# Altium integrated library VIETTIEN.IntLib: 173 symbols (part 5 of 8)

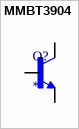
[diagram p92: symbol MMBT3904]

## MMBT3904
designator Q?
BJT, SOT-23, 40V, 200mA, NPN, 0.35W, 150Â°C; MF: Diotec Semiconductor; MP: MMBT3904; SnapEDA_Link: https://www.snapeda.com/parts/MMBT3904/Diotec/view-part/?ref=snap; Package: SOT-23 Diotec; Value: *; Check_prices: https://www.snapeda.com/parts/MMBT3904/Diotec/view-part/?ref=eda
footprint TRANS_MMBT3904
pins: 1 B, 2 E, 3 C


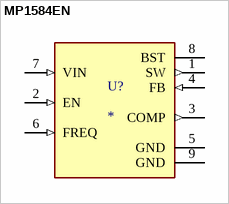
[diagram p93: symbol MP1584EN]

## MP1584EN
designator U?
Buck Switching Regulator IC Positive Adjustable 0.8V 1 Output 3A 8-SOIC (0.154, 3.90mm Width) Exposed Pad; MF: Monolithic Power; MP: MP1584EN; SnapEDA_Link: https://www.snapeda.com/parts/MP1584EN/Monolithic+Power+Systems/view-part/?ref=snap; Package: SOIC-8 Monolithic Power; Value: *; Check_prices: https://www.snapeda.com/parts/MP1584EN/Monolithic+Power+Systems/view-part/?ref=eda
footprint SOIC127P600X170-9N
pins: 1 SW (out), 2 EN (in), 3 COMP (out), 4 FB (in), 5 GND (power), 6 FREQ (in), 7 VIN (in), 8 BST, 9 GND (power)


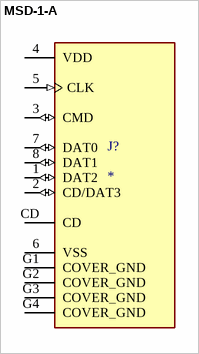
[diagram p94: symbol MSD-1-A]

## MSD-1-A
designator J?
Micro SD Card Connector, 9 Positions, Connector and Ejector, Push In, Auto Eject Out, Surface Mount, 1.8 mm Height Above Board, Gold Flash; MF: Same Sky; MP: MSD-1-A; SnapEDA_Link: https://www.snapeda.com/parts/MSD-1-A/Same+Sky/view-part/?ref=snap; Package: None; Value: *; Check_prices: https://www.snapeda.com/parts/MSD-1-A/Same+Sky/view-part/?ref=eda
footprint CUI_MSD-1-A
pins: 1 DAT2 (io), 2 CD/DAT3 (io), 3 CMD (io), 4 VDD (power), 5 CLK (in), 6 VSS (power), 7 DAT0 (io), 8 DAT1 (io), CD, G1 COVER_GND (power), G2 COVER_GND (power), G3 COVER_GND (power), G4 COVER_GND (power)


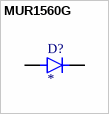
[diagram p95: symbol MUR1560G]

## MUR1560G
designator D?
Diode Standard 600 V 15A Through Hole TO-220-2; MF: ON Semiconductor; MP: MUR1560G; Check_prices: https://www.snapeda.com/parts/MUR1560G/Onsemi/view-part/?ref=eda; Value: *; Purchase-URL: https://pricing.snapeda.com/search/part/MUR1560G/?ref=eda; Price: None; Package: TO-220-2 ON Semiconductor; Availability: In Stock; SnapEDA_Link: https://www.snapeda.com/parts/MUR1560G/Onsemi/view-part/?ref=snap
footprint TO508P997X444X1905-2
pins: 1 K, 3 A


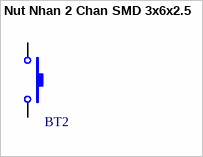
[diagram p96: symbol Nut Nhan 2 Chan SMD 3x6x2.5]

## Nut Nhan 2 Chan SMD 3x6x2.5
designator BT2  (value not drawn)
Ma_Hang: MH001036; Ten: Nút Nhấn 2 Chân 3x6x2.5MM SMD
footprint PCBComponent_1
pins: 1, 2


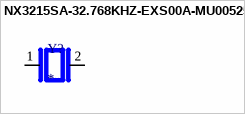
[diagram p97: symbol NX3215SA-32.768KHZ-EXS00A-MU00525]

## NX3215SA-32.768KHZ-EXS00A-MU00525
designator Y?
32.768 kHz - Crystal 6pF 50 kOhms 2-SMD, No Lead; MF: NDK America,; MP: NX3215SA-32.768KHZ-EXS00A-MU00525; SnapEDA_Link: https://www.snapeda.com/parts/NX3215SA-32.768KHZ-EXS00A-MU00525/NDK/view-part/?ref=snap; Package: SMD-2 NDK; Value: *; Check_prices: https://www.snapeda.com/parts/NX3215SA-32.768KHZ-EXS00A-MU00525/NDK/view-part/?ref=eda
footprint XTAL_NX3215SA-32.768KHZ-EXS00A-MU00525
pins: 1, 2


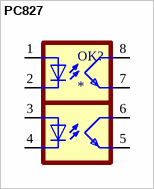
[diagram p98: symbol PC827]

## PC827
designator OK?
PowerPC G2_LE Microprocessor IC MPC82xx 1 Core, 32-Bit 450MHz 480-TBGA (37.5x37.5); MF: Sharp Microelectronics; MP: PC827; Price: None; SnapEDA_Link: https://www.snapeda.com/parts/PC827/Sharp%20Microelectronics/view-part/1087397/?ref=snap; Availability: Unavailable; Value: *; Package: DIP-8 Sharp; Check_prices: https://www.snapeda.com/parts/PC827/Sharp%20Microelectronics/view-part/1087397/?ref=eda
footprint DIL08
pins: 1 A, 2 C, 3 A, 4 C, 5 EMIT, 6 COL, 7 EMIT, 8 COL


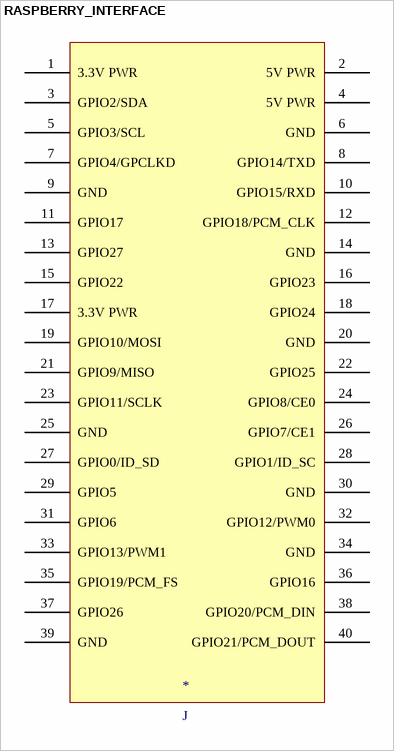
[diagram p99: symbol RASPBERRY_INTERFACE]

## RASPBERRY_INTERFACE
designator *, comment J
RASPBERRY_INTERFACE
footprint GPIO_INTERFACE
pins: 1 3.3V PWR, 2 5V PWR, 3 GPIO2/SDA, 4 5V PWR, 5 GPIO3/SCL, 6 GND, 7 GPIO4/GPCLKD, 8 GPIO14/TXD, 9 GND, 10 GPIO15/RXD, 11 GPIO17, 12 GPIO18/PCM_CLK, 13 GPIO27, 14 GND, 15 GPIO22, 16 GPIO23, 17 3.3V PWR, 18 GPIO24, 19 GPIO10/MOSI, 20 GND, 21 GPIO9/MISO, 22 GPIO25, 23 GPIO11/SCLK, 24 GPIO8/CE0, 25 GND, 26 GPIO7/CE1, 27 GPIO0/ID_SD, 28 GPIO1/ID_SC, 29 GPIO5, 30 GND, 31 GPIO6, 32 GPIO12/PWM0, 33 GPIO13/PWM1, 34 GND, 35 GPIO19/PCM_FS, 36 GPIO16, 37 GPIO26, 38 GPIO20/PCM_DIN, 39 GND, 40 GPIO21/PCM_DOUT


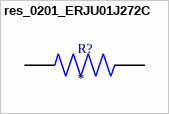
[diagram p100: symbol res_0201_ERJU01J272C]

## res_0201_ERJU01J272C
designator R?
MP: ERJU01J272C; Availability: Unavailable; Price: None; Package: None; Value: *
footprint RES_ERJU01J272C
pins: 1, 2


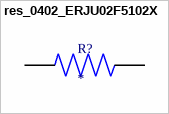
[diagram p101: symbol res_0402_ERJU02F5102X]

## res_0402_ERJU02F5102X
designator R?
MP: ERJU02F5102X; Availability: Unavailable; Price: None; Package: None; Value: *
footprint RES_ERJU02F5102X
pins: 1, 2


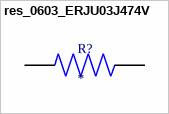
[diagram p102: symbol res_0603_ERJU03J474V]

## res_0603_ERJU03J474V
designator R?
0603 Anti-Sulfurated; MF: Panasonic; MP: ERJU03J474V; SnapEDA_Link: https://www.snapeda.com/parts/ERJU03J474V/Panasonic/view-part/?ref=snap; Package: 1608-2 Panasonic; Value: *; Check_prices: https://www.snapeda.com/parts/ERJU03J474V/Panasonic/view-part/?ref=eda
footprint RES_ERJU03J474V
pins: 1, 2


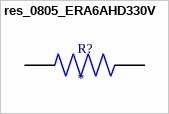
[diagram p103: symbol res_0805_ERA6AHD330V]

## res_0805_ERA6AHD330V
designator R?
RES 0805; MP: ERA6AHD330V; Package: None; Price: None; Value: *; Availability: Unavailable
footprint RES_ERA6AHD330V
pins: 1, 2


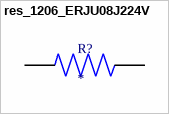
[diagram p104: symbol res_1206_ERJU08J224V]

## res_1206_ERJU08J224V
designator R?
RES 1206; MP: ERJU08J224V; Value: *; Price: None; Package: None; Availability: Unavailable
footprint RES_ERJU08J224V
pins: 1, 2


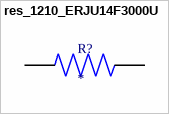
[diagram p105: symbol res_1210_ERJU14F3000U]

## res_1210_ERJU14F3000U
designator R?
RES_1210; MP: ERJU14F3000U; Availability: Unavailable; Package: None; Value: *; Price: None
footprint RES_ERJU14F3000U
pins: 1, 2


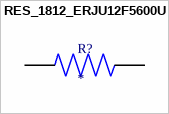
[diagram p106: symbol RES_1812_ERJU12F5600U]

## RES_1812_ERJU12F5600U
designator R?
RES 1812; MP: ERJU12F5600U; Package: None; Value: *; Availability: Unavailable; Price: None
footprint RES_ERJU12F5600U
pins: 1, 2


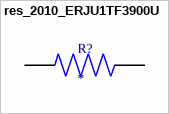
[diagram p107: symbol res_2010_ERJU1TF3900U]

## res_2010_ERJU1TF3900U
designator R?
RES 2010; MP: ERJU1TF3900U; Price: None; Value: *; Availability: Unavailable; Package: None
footprint RES_ERJU1TF3900U
pins: 1, 2


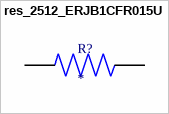
[diagram p108: symbol res_2512_ERJB1CFR015U]

## res_2512_ERJB1CFR015U
designator R?
RES 2512; MP: ERJB1CFR015U; Price: None; Value: *; Package: None; Availability: Unavailable
footprint RES_ERJB1CFR015U
pins: 1, 2


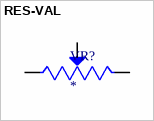
[diagram p109: symbol RES-VAL]

## RES-VAL
designator VR?
Trimmer, Cermet, Rest 1 Kilohms, PCB, 25 Turns, Pwr-Rtg 0.5W | Bourns 3296W-1-102LF; SnapEDA_Link: https://www.snapeda.com/parts/3296W-1-102LF/Bourns/view-part/?ref=snap; Package: NON STANDARD-3 Bourns; Value: *; MF: Bourns; MP: 3296W-1-102LF; Check_prices: https://www.snapeda.com/parts/3296W-1-102LF/Bourns/view-part/?ref=eda
footprint TRIM_3296W-1-102LF
pins: 1 CCW, 2 WIPER, 3 CW


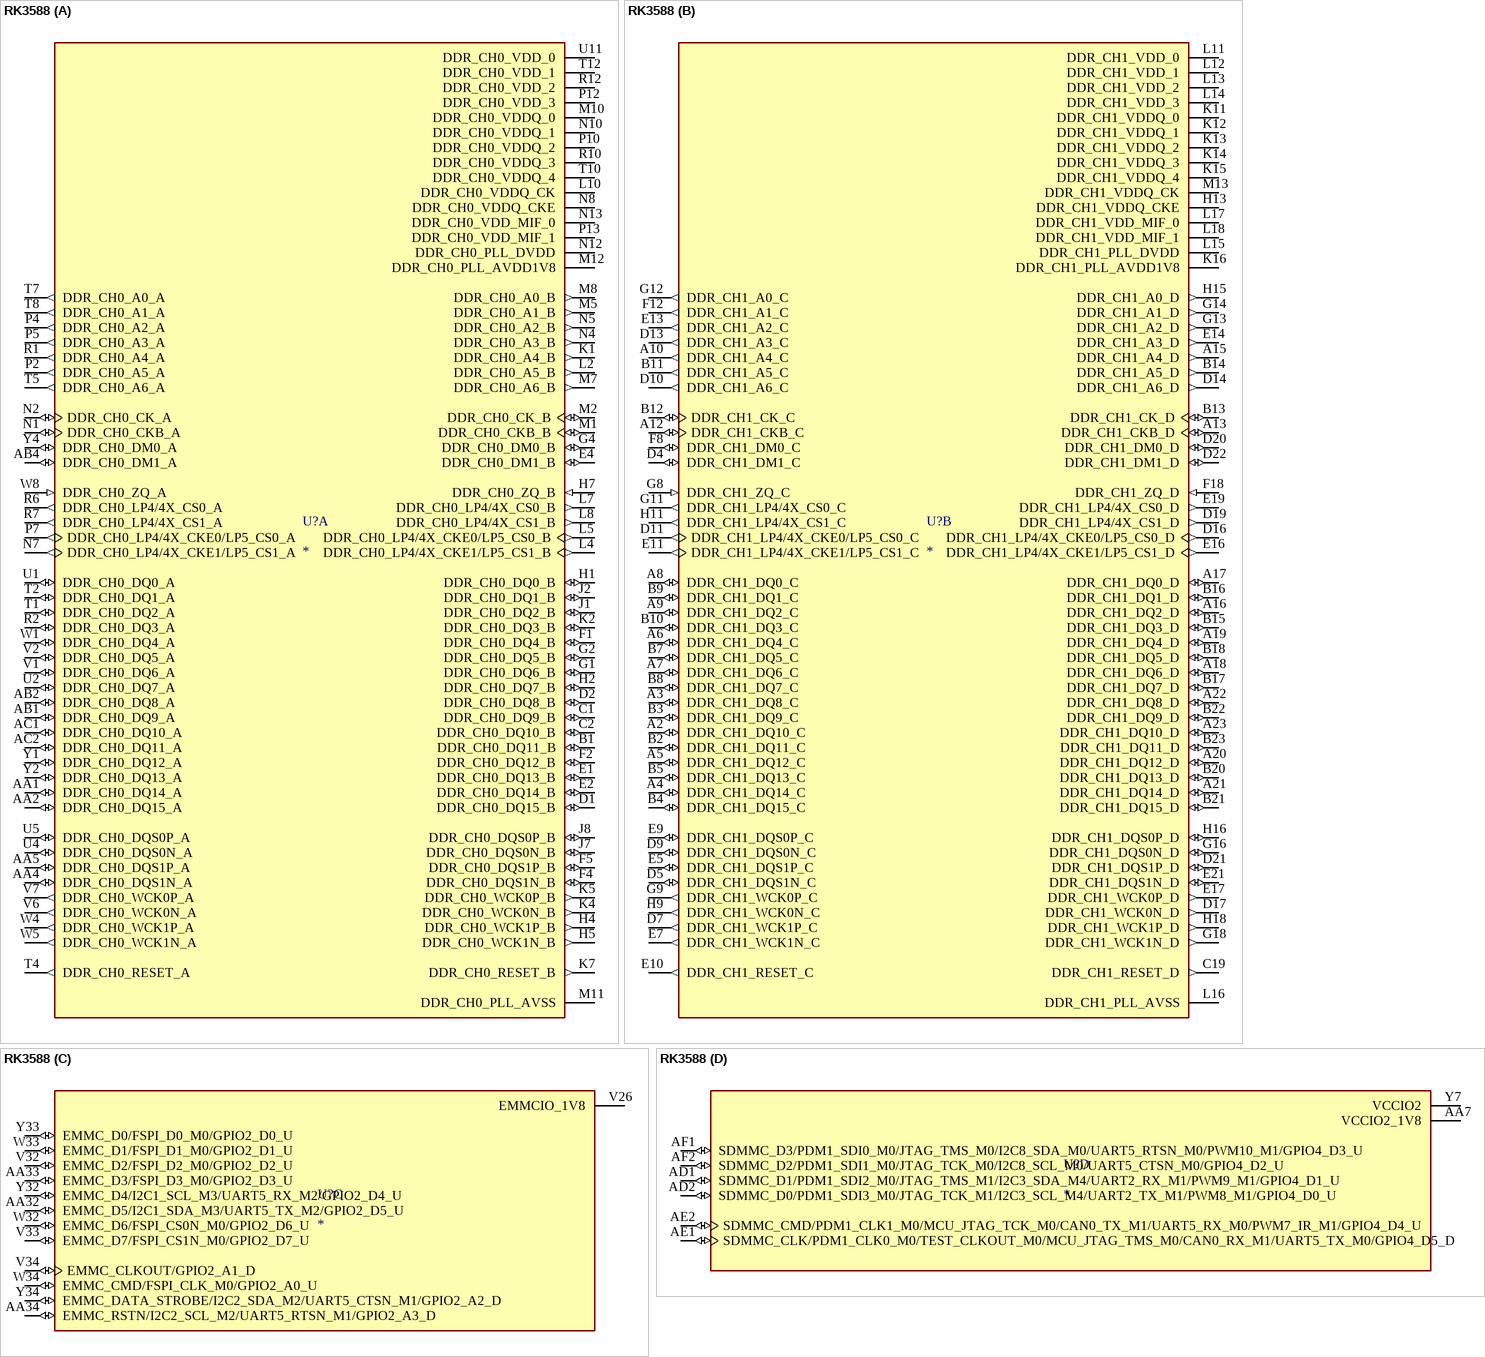
[diagram p110: symbol RK3588]

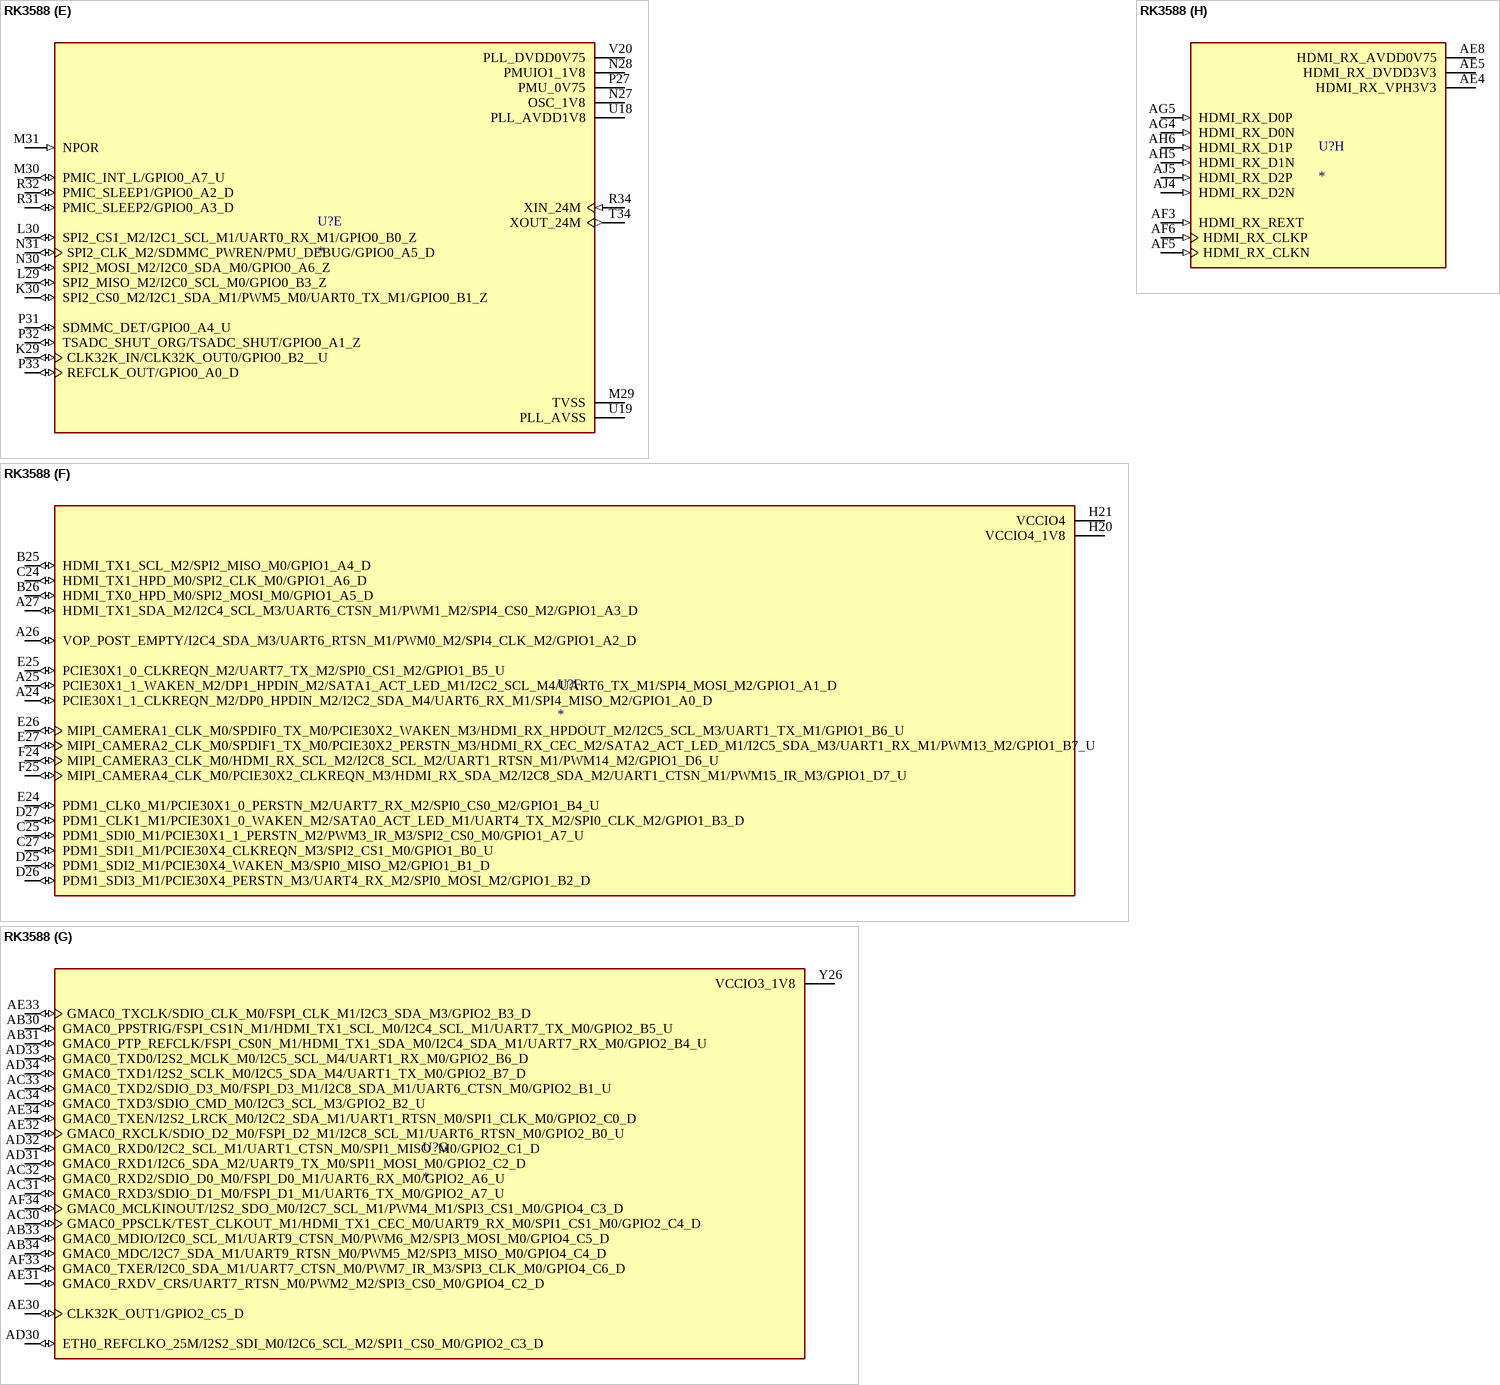
[diagram p111: symbol RK3588]

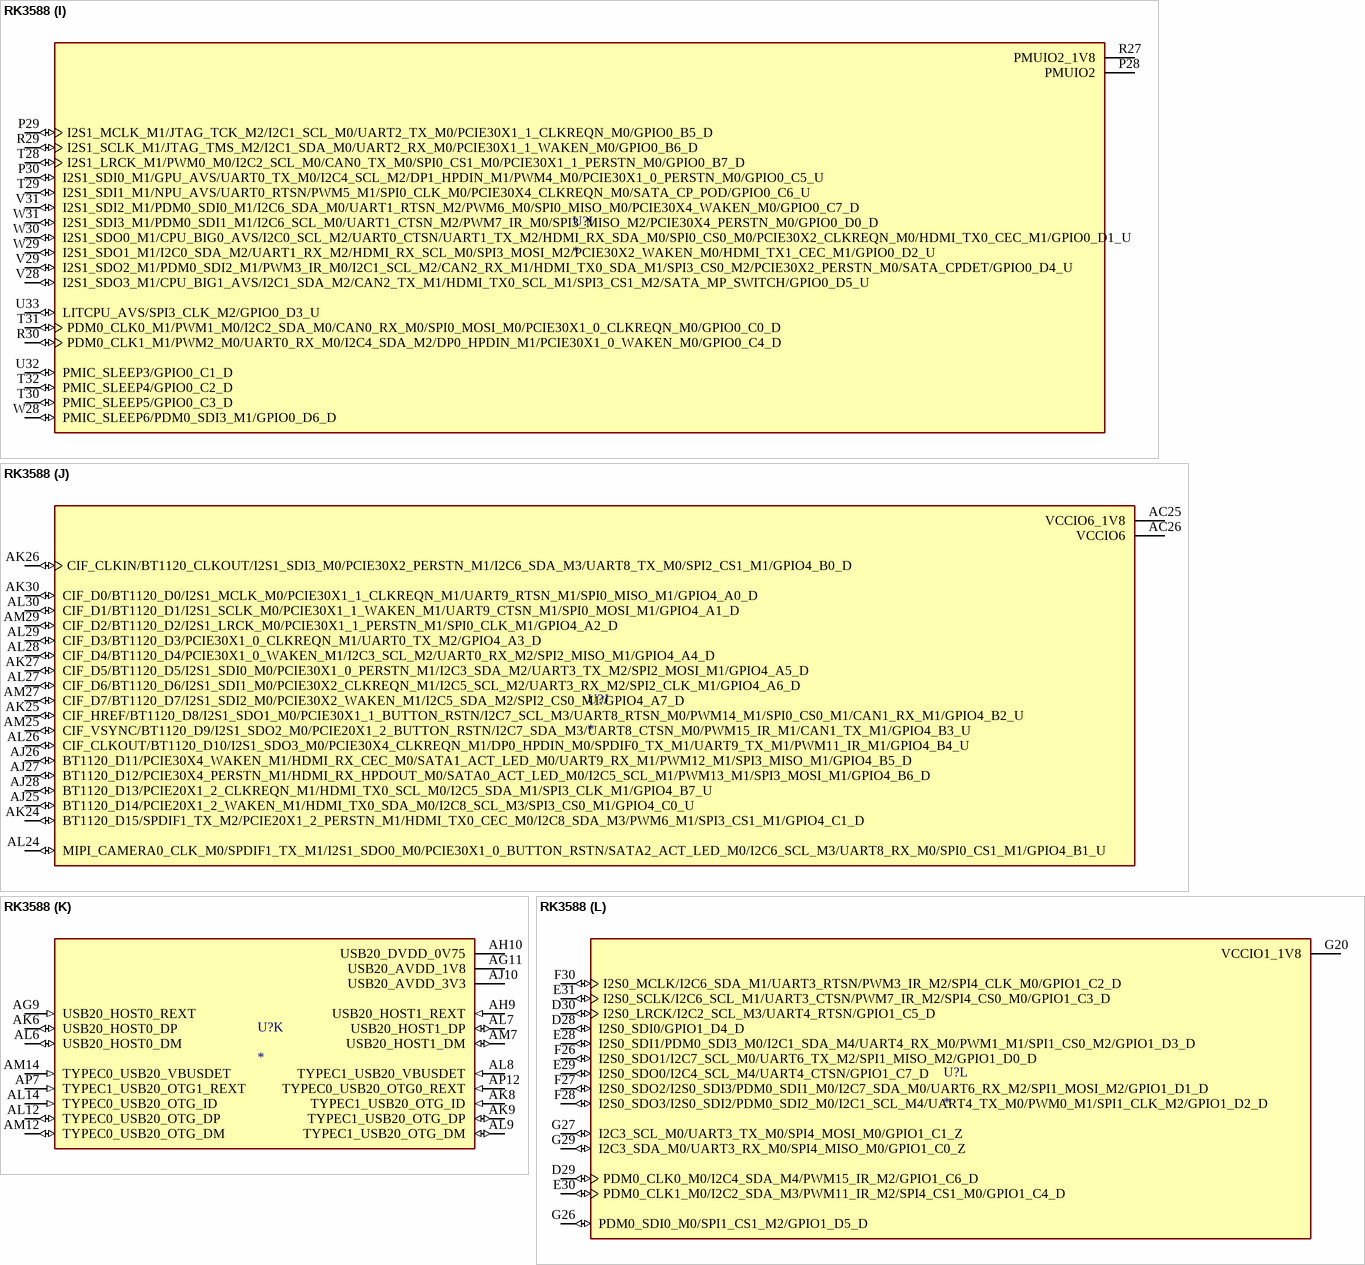
[diagram p112: symbol RK3588]

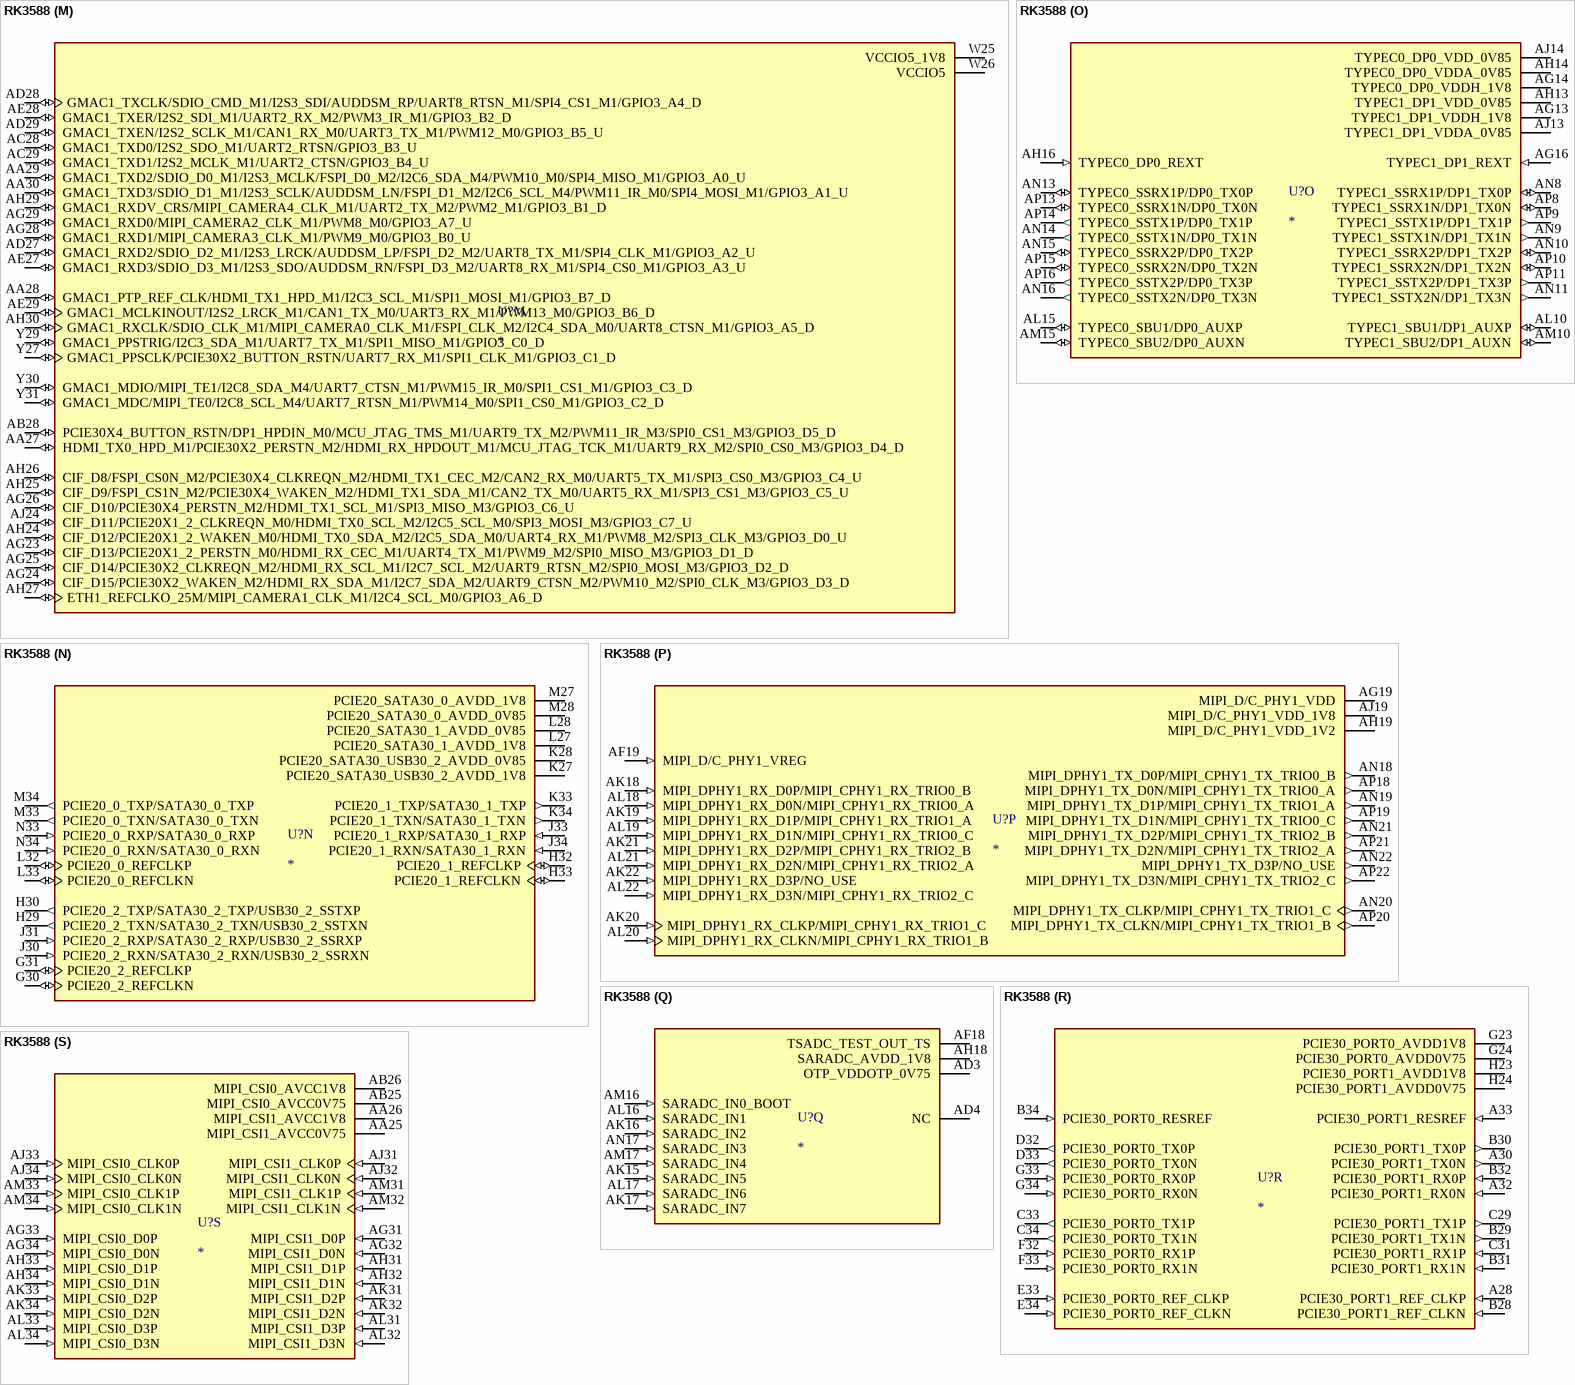
[diagram p113: symbol RK3588]

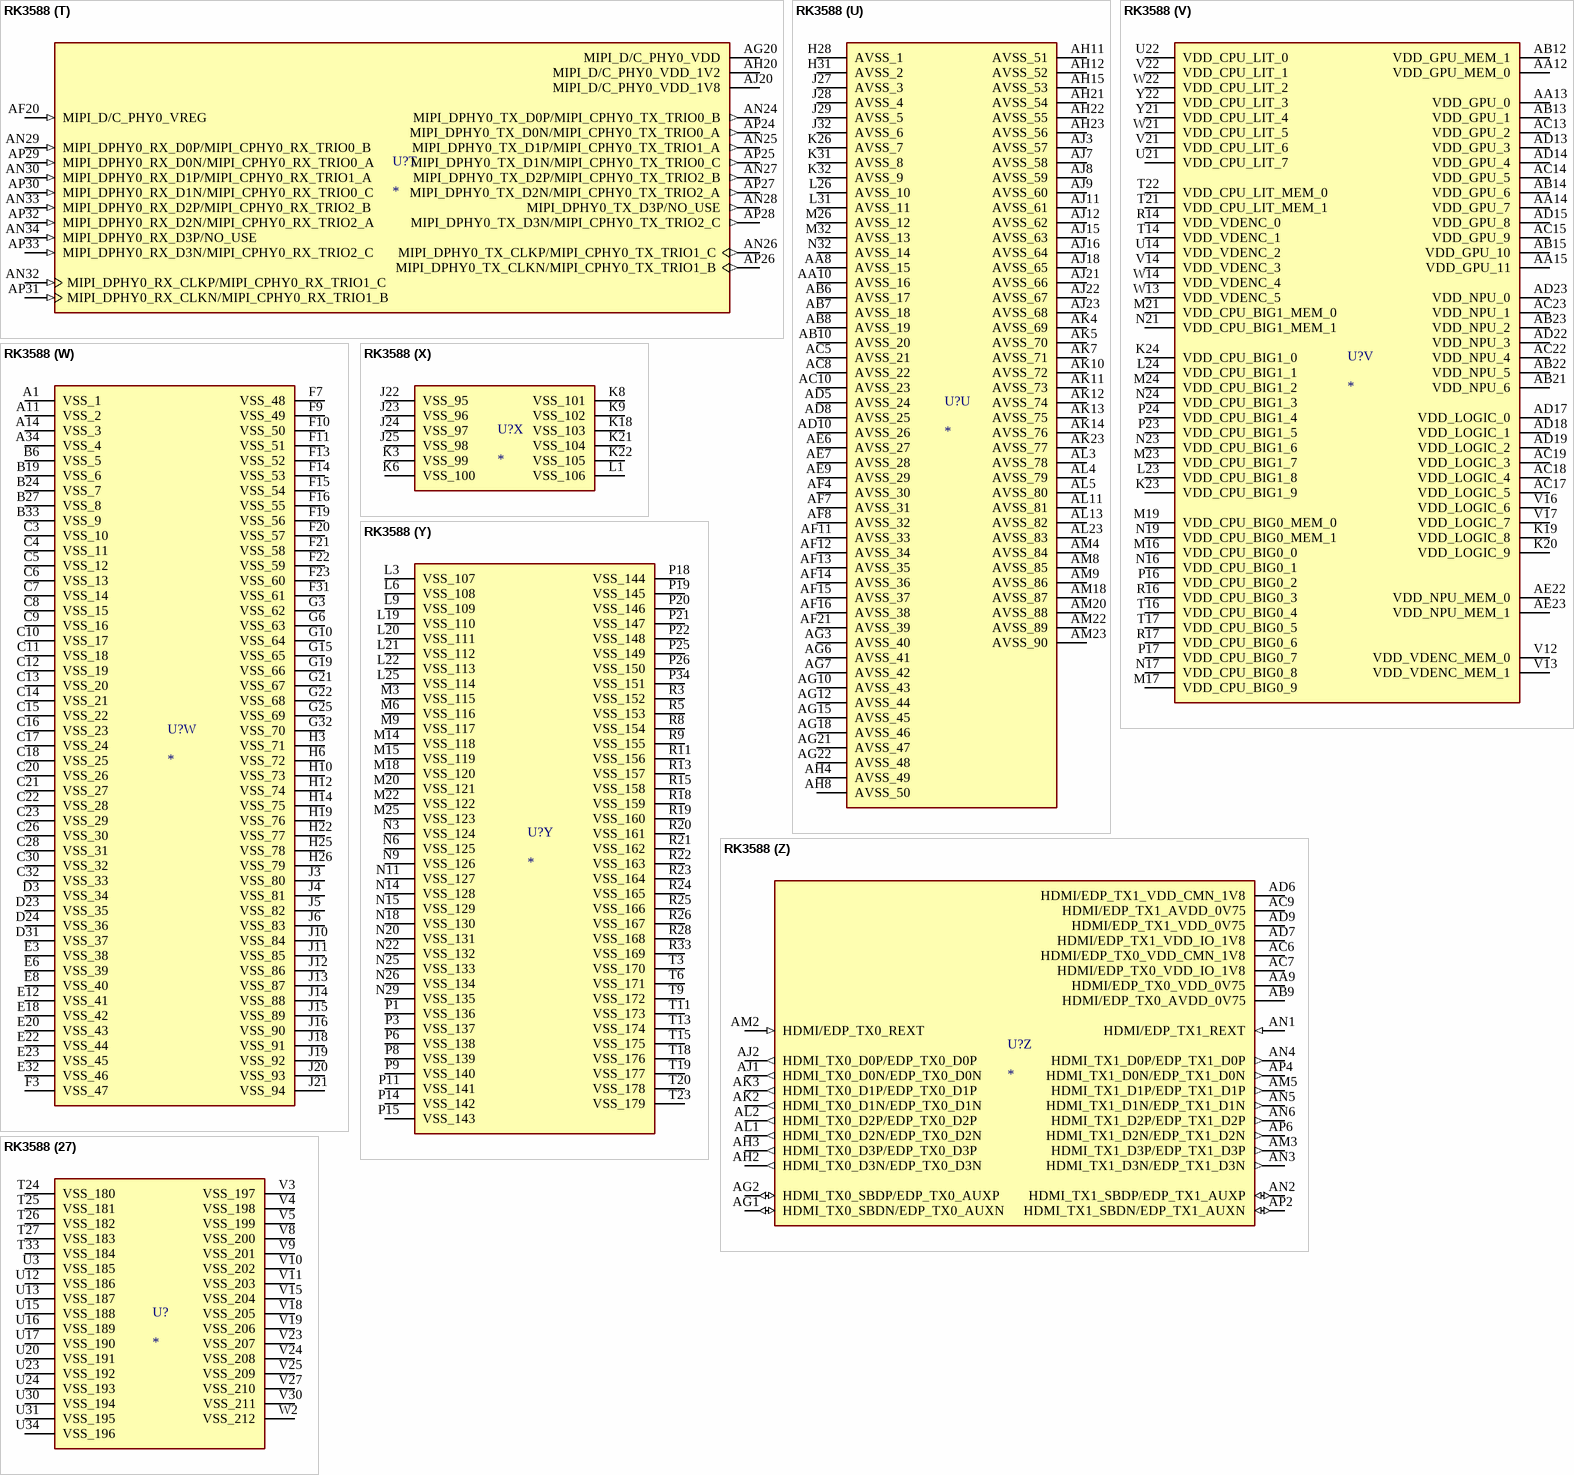
[diagram p114: symbol RK3588]